# Altium footprint library GRM155R61A475MEAAD.PcbLib: 4 footprints
Each footprint in its own frame and in the unit in brackets; x right, y up, seen from the top. Pads: shape width x height; smd on the part's side, far side on the other; paste and mask are expansions set on the pad; w line width, h text height; cw(c..) or ccw(c..) is an arc to the next point about the centre after c.
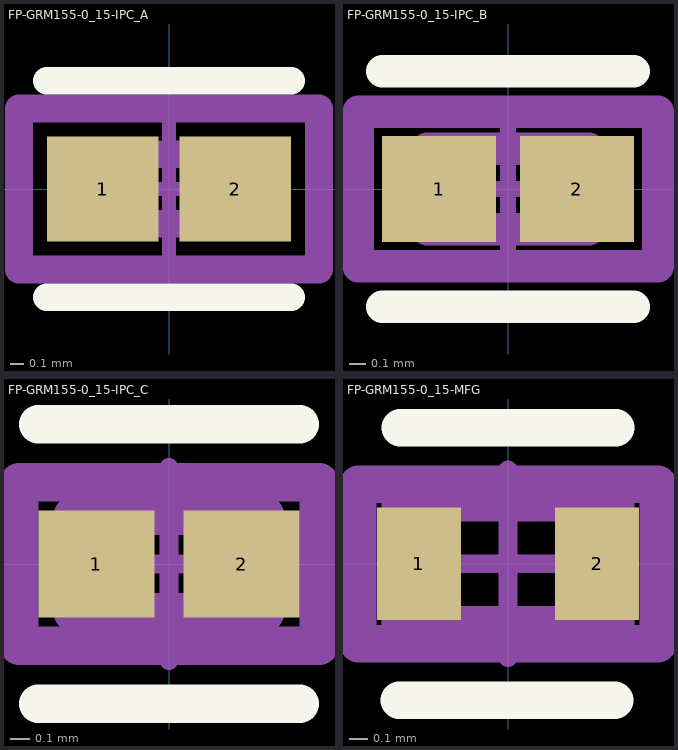
[diagram p0: the footprints below, top view; thin cyan lines are the x and y axes]

## FP-GRM155-0_15-IPC_A [mm]
pads (2):
  rect 0.804x0.758 smd paste+0 mask+0: 1(-0.477,0) 2(0.477,0)
Top Overlay:
  lines w0.2: -0.879,-0.779 0.879,-0.779 ; -0.879,0.779 0.879,0.779
Top Assembly:
  lines w0.2: -1.079,-0.579 1.079,-0.579 1.079,0.579 -1.079,0.579 -1.079,-0.579
  text ".Designator" at 0,0.187 h1
Top 3D Body:
  lines w0.2: -0.5,-0.25 0.5,-0.25 0.5,0.25 -0.5,0.25 -0.5,-0.25
Top Courtyard:
  lines w0.2: -1.079,-0.579 1.079,-0.579 1.079,0.579 -1.079,0.579 -1.079,-0.579
Top Component Center:
  lines w0.1: -0.5,0 0.5,0 ; 0,-0.5 0,0.5
3D body "Cap_Murata_GRM155R61A475MEAAD_eec.STEP": height 0.25, standoff 0, extent -1.079,-0.579 1.079,0.579

## FP-GRM155-0_15-IPC_B [mm]
pads (2):
  rect 0.704x0.658 smd paste+0 mask+0: 1(-0.427,0) 2(0.427,0)
Top Overlay:
  lines w0.2: -0.779,-0.729 0.779,-0.729 ; -0.779,0.729 0.779,0.729
Top Assembly:
  lines w0.2: -0.929,-0.479 0.929,-0.479 0.929,0.479 -0.929,0.479 -0.929,-0.479
  text ".Designator" at 0,0.187 h1
Top 3D Body:
  lines w0.2: -0.5,-0.25 0.5,-0.25 0.5,0.25 -0.5,0.25 -0.5,-0.25
Top Courtyard:
  lines w0.2: -0.929,-0.479 0.929,-0.479 0.929,0.479 -0.929,0.479 -0.929,-0.479
Top Component Center:
  lines w0.1: -0.5,0 0.5,0 ; 0,-0.5 0,0.5
3D body "Cap_Murata_GRM155R61A475MEAAD_eec.STEP": height 0.25, standoff 0, extent -0.929,-0.479 0.929,0.479

## FP-GRM155-0_15-IPC_C [mm]
pads (2):
  rect 0.604x0.558 smd paste+0 mask+0: 1(-0.377,0) 2(0.377,0)
Top Overlay:
  lines w0.2: -0.679,-0.725 0.679,-0.725 ; -0.679,0.725 0.679,0.725
Top Assembly:
  lines w0.2: -0.779,-0.425 0.779,-0.425 0.779,0.425 -0.779,0.425 -0.779,-0.425
  text ".Designator" at 0,0.187 h1
Top 3D Body:
  lines w0.2: -0.5,-0.25 0.5,-0.25 0.5,0.25 -0.5,0.25 -0.5,-0.25
Top Courtyard:
  lines w0.2: -0.779,-0.425 0.779,-0.425 0.779,0.425 -0.779,0.425 -0.779,-0.425
Top Component Center:
  lines w0.1: -0.5,0 0.5,0 ; 0,-0.5 0,0.5
3D body "Cap_Murata_GRM155R61A475MEAAD_eec.STEP": height 0.25, standoff 0, extent -0.779,-0.425 0.779,0.425

## FP-GRM155-0_15-MFG [mm]
pads (2):
  rect 0.45x0.6 smd paste+0 mask+0: 1(-0.475,0) 2(0.475,0)
Top Overlay:
  lines w0.2: -0.58,-0.727 0.57,-0.727 ; -0.575,0.725 0.575,0.725
Top Assembly:
  lines w0.2: -0.8,-0.425 0.8,-0.425 0.8,0.425 -0.8,0.425 -0.8,-0.425
  text ".Designator" at 0,0.187 h1
Top 3D Body:
  lines w0.2: -0.575,-0.325 0.575,-0.325 0.575,0.325 -0.575,0.325 -0.575,-0.325
Top Courtyard:
  lines w0.2: -0.8,-0.425 0.8,-0.425 0.8,0.425 -0.8,0.425 -0.8,-0.425
Top Component Center:
  lines w0.1: -0.5,0 0.5,0 ; 0,-0.5 0,0.5
3D body "Cap_Murata_GRM155R61A475MEAAD_eec.STEP": height 0.25, standoff 0, extent -0.8,-0.425 0.8,0.425